# Altium footprint library LM76003RNPR.PcbLib: 1 footprints
Each footprint in its own frame and in the unit in brackets; x right, y up, seen from the top. Pads: shape width x height; smd on the part's side, far side on the other; paste and mask are expansions set on the pad; w line width, h text height; cw(c..) or ccw(c..) is an arc to the next point about the centre after c.
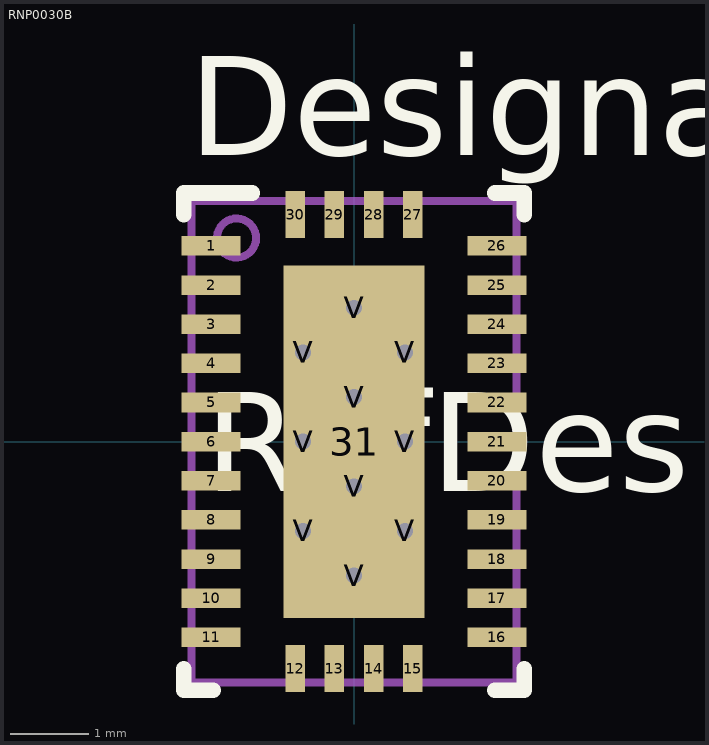
[diagram p0: the footprint, top view; thin cyan lines are the x and y axes]

## RNP0030B [mm]
pads (41):
  rect 0.75x0.25 smd paste+0 mask+0.051: 1(-1.825,2.5) 2(-1.825,2) 3(-1.825,1.5) 4(-1.825,1) 5(-1.825,0.5) 6(-1.825,0) 7(-1.825,-0.5) 8(-1.825,-1) 9(-1.825,-1.5) 10(-1.825,-2) 11(-1.825,-2.5) 16(1.825,-2.5) 17(1.825,-2) 18(1.825,-1.5) 19(1.825,-1) 20(1.825,-0.5) 21(1.825,0) 22(1.825,0.5) 23(1.825,1) 24(1.825,1.5) 25(1.825,2) 26(1.825,2.5)
  rect 0.25x0.6 smd paste+0 mask+0.051: 12(-0.75,-2.9) 13(-0.25,-2.9) 14(0.25,-2.9) 15(0.75,-2.9) 27(0.75,2.9) 28(0.25,2.9) 29(-0.25,2.9) 30(-0.75,2.9)
  rect 1.8x4.5 smd paste-2.237 mask+0.051: 31(0,0)
  round 0.5 / inner round 1.524 / far side round 0.5 hole 0.203 paste-2539.97 mask+0.051: V(-0.65,-1.14) V(-0.65,0) V(-0.65,1.14) V(0,-1.71) V(0,-0.57) V(0,0.57) V(0,1.71) V(0.65,-1.14) V(0.65,0) V(0.65,1.14)
Top Overlay:
  lines w0.2: -2.175,-2.9 -2.175,-3.175 -1.8,-3.175 ; -2.175,2.9 -2.175,3.175 -1.3,3.175 ; 1.8,-3.175 2.175,-3.175 2.175,-2.9 ; 1.8,3.175 2.175,3.175 2.175,2.9
  text "RefDes" at -1.905,-0.635 h1.27
  text "Designator9" at -2.108,3.658 h1.27
Top Paste:
  drawing of 8 lines, arcs and shapes, not listed
Mechanical 13:
  circle w0.1: c-1.5,2.6 r0.25
  lines w0.1: -2.075,-3.075 2.075,-3.075 2.075,3.075 -2.075,3.075 -2.075,-3.075